# EAGLE library part ARJM11D7-114-AB-EW2 (library ARJM11D7-114-AB-EW2)
Modular Connectors / Ethernet Connectors Source: Datasheet
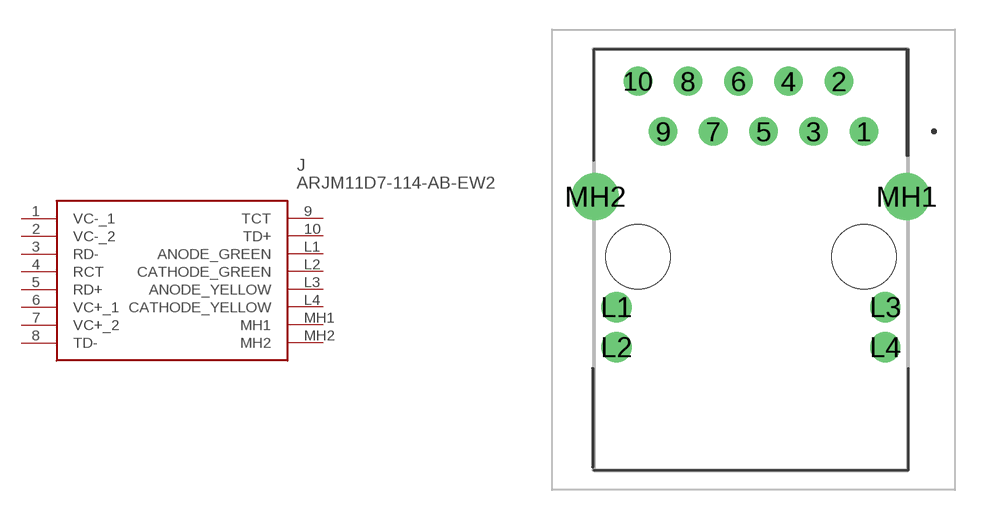
[diagram p0: symbol with the pads of ARJM11D7114ABEW2; footprint ARJM11D7114ABEW2]

Designator prefix J

## ARJM11D7-114-AB-EW2 (Description: Modular Connectors / Ethernet Connectors; Height: 13.6mm; Manufacturer_Name: ABRACON; Manufacturer_Part_Number: ARJM11D7-114-AB-EW2; Mouser_Part_Number: 815-RJM11D7114ABEW2; Mouser_Price-Stock: https://www.mouser.co.uk/ProductDetail/ABRACON/ARJM11D7-114-AB-EW2?qs=YCa%2FAAYMW02ICsJcHu%252BNJg%3D%3D)  [ARJM11D7114ABEW2]
1  VC-_1
2  VC-_2
3  RD-
4  RCT
5  RD+
6  VC+_1
7  VC+_2
8  TD-
9  TCT
10  TD+
L1  ANODE_GREEN
L2  CATHODE_GREEN
L3  ANODE_YELLOW
L4  CATHODE_YELLOW
MH1  MH1
MH2  MH2

## Footprint ARJM11D7114ABEW2 (pad centres in mm)
ARJM11D7-114-AB-EW2-2
drill 0.89 pad 1.446: 1 0,0; 2 -1.27,2.54; 3 -2.54,0; 4 -3.81,2.54; 5 -5.08,0; 6 -6.35,2.54; 7 -7.62,0; 8 -8.89,2.54; 9 -10.16,0; 10 -11.43,2.54
drill 1.02 pad 1.53: L1 -12.515,-8.9; L2 -12.515,-10.93; L3 1.085,-8.9; L4 1.085,-10.93
drill 1.57 pad 2.355: MH1 2.16,-3.3; MH2 -13.59,-3.3
hole 3.25 at 0,-6.35
hole 3.25 at -11.43,-6.35